# Altium footprint library PCB8.PcbLib: 32 footprints (part 1 of 2)
Each footprint in its own frame and in the unit in brackets; x right, y up, seen from the top. Pads: shape width x height; smd on the part's side, far side on the other; paste and mask are expansions set on the pad; w line width, h text height; cw(c..) or ccw(c..) is an arc to the next point about the centre after c.
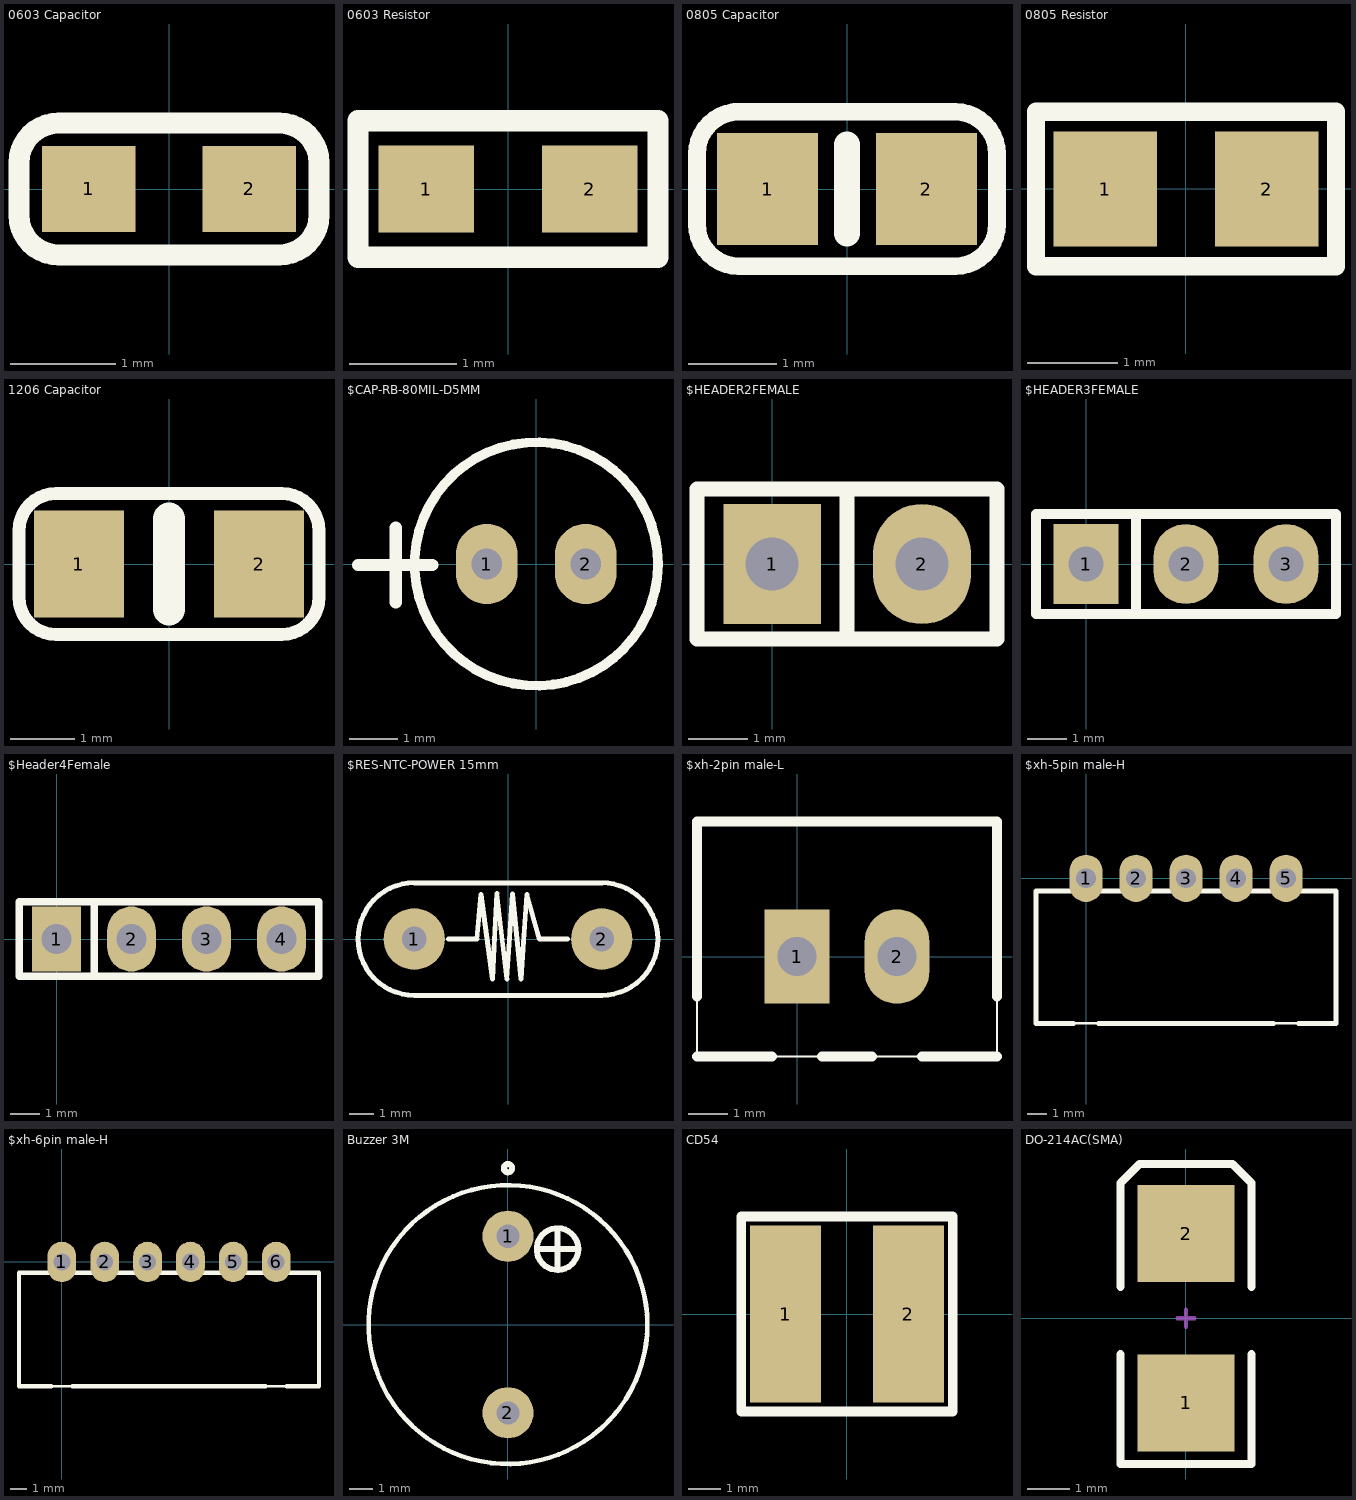
[diagram p0: the footprints below, top view; thin cyan lines are the x and y axes]

## 0603 Capacitor [mil]
height 192.91
pads (2):
  rect 35x32 smd: 1(-29.99,0.01) 2(30.01,0.01)
Top Overlay:
  lines w7.87: -56.1,-9.84 ccw(c-41.34,-9.84) -41.34,-24.61 41.34,-24.61 ccw(c41.34,-9.84) 56.1,-9.84 56.1,9.84 ccw(c41.34,9.84) 41.34,24.61 -41.34,24.61 ccw(c-41.34,9.84) -56.1,9.84 -56.1,-9.84
3D body "SW3dPS-0603 SMD Capacitor.STEP": height 11.89, standoff 0, extent -31.49,-15.74 31.5,15.75

## 0603 Resistor [mil]
height 192.91
pads (2):
  rect 35x32 smd: 1(-30,0) 2(30,0)
Top Overlay:
  lines w7.87: -55,-25 55,-25 55,25 -55,25 -55,-25
3D body "User Library-RESC1608X05N.STEP": height 17.76, standoff 0, extent -30.51,-16.73 30.52,16.73

## 0805 Capacitor [mm]
pads (2):
  rect 1.143x1.27 smd: 1(-0.9,0) 2(0.9,0)
Top Overlay:
  lines w0.2: -1.275,0.875 1.225,0.875 cw(c1.225,0.4) 1.7,0.4 1.7,-0.4 cw(c1.225,-0.4) 1.225,-0.875 -1.225,-0.875 cw(c-1.225,-0.4) -1.7,-0.4 -1.7,0.4 cw(c-1.225,0.4) -1.225,0.875
  lines w0.3: 0,-0.5 0,0.5
3D body "SW3dPS-0805 SMD Capacitor.STEP": height 0.78, standoff 0, extent -1,-0.625 1,0.625

## 0805 Resistor [mil]
pads (2):
  rect 45x50 smd: 1(-35,0) 2(35,0)
Top Overlay:
  lines w7.87: -65,-33.46 -65,33.46 65,33.46 65,-33.46 -65,-33.46
3D body "User Library-RESC2012X05N.STEP": height 17.76, standoff 0, extent -39.36,-24.6 39.38,24.61

## 1206 Capacitor [mil]
height 70.87
pads (2):
  rect 55x65 smd: 1(-55,0) 2(55,0)
Top Overlay:
  lines w7.87: -91.54,-20.4 ccw(c-68.9,-20.4) -68.9,-43.03 68.89,-43.03 ccw(c68.89,-20.39) 91.53,-20.39 91.53,20.4 ccw(c68.89,20.4) 68.89,43.04 -68.9,43.03 ccw(c-68.9,20.4) -91.54,20.4 -91.54,-20.4
  lines w19.68: 0,-27.56 0,27.56
3D body "SW3dPS-1206 SMD Capacitor.STEP": height 39.45, standoff 0, extent -62.99,-31.5 63,31.5

## $CAP-RB-80MIL-D5MM [mil]
height 192.91
pads (2):
  oval 50x65 hole 25: 1(-40,0) 2(40,0)
Top Overlay:
  circle w7.87: c0,0 r98.43
  lines w10: -144.08,-0.79 -84.08,-0.79 ; -113.69,-30.79 -113.69,29.21
3D body "SW3dPS-Cap electro 5x11x2mm.STEP": height 445.88, standoff -136.68, extent -99.43,-99.43 99.42,99.42

## $HEADER2FEMALE [mil]
height 192.91
pads (2):
  rect 65x80 hole 35.43: 1(0,0)
  oval 65x80 hole 35.43: 2(100,0)
Top Overlay:
  lines w10: 50,-50 50,50 ; -50,-50 150,-50 150,50 -50,50 -50,-50
3D body: height 350, standoff 0, extent -50,-50 150,50
3D body: height 300, standoff -100, extent -14.96,-14.93 14.92,15.01
3D body: height 300, standoff -100, extent 85.12,-14.96 115,14.98

## $HEADER3FEMALE [mil]
pads (3):
  rect 65x80 hole 35.43: 1(0,0)
  oval 65x80 hole 35.43: 2(100,0) 3(200,0)
Top Overlay:
  lines w10: 50,-50 50,50 ; -50,-50 250,-50 250,50 -50,50 -50,-50
3D body: height 350, standoff 0, extent -50,-50 250,50
3D body: height 300, standoff -100, extent -14.88,-14.96 15,14.98
3D body: height 300, standoff -100, extent 85.12,-14.96 115,14.98
3D body: height 300, standoff -100, extent 185.12,-14.96 215,14.98

## $Header4Female [mm]
pads (4):
  rect 1.65x2.2 hole 1: 1(0,0)
  oval 1.65x2.2 hole 1: 2(2.54,0) 3(5.08,0) 4(7.62,0)
Top Overlay:
  lines w0.254: 1.27,-1.27 1.27,1.27 ; -1.27,-1.27 8.89,-1.27 8.89,1.27 -1.27,1.27 -1.27,-1.27
3D body: height 8.89, standoff 0, extent -1.27,-1.27 8.89,1.27
3D body: height 7.62, standoff -2.54, extent -0.381,-0.381 0.381,0.381
3D body: height 7.62, standoff -2.54, extent 2.159,-0.381 2.921,0.381
3D body: height 7.62, standoff -2.54, extent 4.699,-0.381 5.461,0.381
3D body: height 7.62, standoff -2.54, extent 7.239,-0.381 8.001,0.381

## $RES-NTC-POWER 15mm [mm]
height 4.9
pads (2):
  round 2.5 hole 1: 1(-3.81,0) 2(3.81,0)
Top Overlay:
  lines w0.2: -3.81,-2.286 cw(c-3.81,0) -3.81,2.286 ; -2.413,0 -1.27,0 ; 1.27,0 2.413,0 ; 3.81,-2.286 ccw(c3.81,0) 3.81,2.286
  lines w0.203: -3.81,-2.286 3.81,-2.286 ; -3.81,2.286 3.81,2.286 ; -1.27,0 -1.092,1.803 -0.635,-1.626 -0.457,1.854 -0.051,-1.626 0.178,1.829 0.533,-1.626 0.762,1.803 1.27,0
3D body "SW3dPS-JVR10N331k_vertical-1.STEP": height 11.49, standoff -3.01, extent -5.498,-1.761 5.498,1.753

## $xh-2pin male-L [mm]
pads (2):
  rect 1.651x2.4 hole 1: 1(0,0)
  oval 1.651x2.4 hole 1: 2(2.54,0)
Top Overlay:
  lines w0.051: -2.54,-2.54 -2.54,-1.016 ; -0.635,-2.54 0.635,-2.54 ; 1.905,-2.54 3.175,-2.54 ; 5.08,-2.54 5.08,-1.016
  lines w0.254: -2.54,-2.54 -0.635,-2.54 ; -2.54,-1.016 -2.54,3.429 5.08,3.429 5.08,-1.016 ; 0.635,-2.54 1.905,-2.54 ; 3.175,-2.54 5.08,-2.54
3D body: height 7.5, standoff 0, extent -2.54,-2.54 5.08,3.429
3D body: height 2.54, standoff -2.29, extent 2.222,-0.299 2.819,0.299
3D body: height 2.54, standoff -2.29, extent -0.318,-0.299 0.279,0.299

## $xh-5pin male-H [mm]
pads (5):
  oval 1.7x2.4 hole 1: 1(0,0) 2(2.54,0) 3(5.08,0) 4(7.62,0) 5(10.16,0)
Top Overlay:
  lines w0.127: -0.635,-7.366 0.635,-7.366 ; 9.525,-7.366 10.795,-7.366
  lines w0.254: -0.635,-7.366 -2.54,-7.366 -2.54,-0.635 12.7,-0.635 12.7,-7.366 10.795,-7.366 ; 0.635,-7.366 9.525,-7.366
3D body: height 5.7, standoff 0.1, extent -2.438,-7.366 12.7,-0.254
3D body: height 2.54, standoff -2.29, extent -0.318,-0.3 0.279,0.299
3D body: height 2.54, standoff -2.29, extent 2.222,-0.3 2.819,0.299
3D body: height 2.54, standoff -2.29, extent 4.762,-0.3 5.359,0.299
3D body: height 2.54, standoff -2.29, extent 7.302,-0.3 7.899,0.299
3D body: height 2.54, standoff -2.29, extent 9.842,-0.3 10.439,0.299

## $xh-6pin male-H [mm]
pads (6):
  oval 1.7x2.4 hole 1: 1(0,0) 2(2.54,0) 3(5.08,0) 4(7.62,0) 5(10.16,0) 6(12.7,0)
Top Overlay:
  lines w0.127: -0.635,-7.366 0.635,-7.366 ; 12.065,-7.366 13.335,-7.366
  lines w0.254: -0.635,-7.366 -2.54,-7.366 -2.54,-0.635 15.24,-0.635 15.24,-7.366 13.335,-7.366 ; 0.635,-7.366 12.065,-7.366
3D body: height 5.7, standoff 0.1, extent -2.438,-7.366 15.24,-0.254
3D body: height 2.54, standoff -2.29, extent -0.318,-0.3 0.279,0.299
3D body: height 2.54, standoff -2.29, extent 2.222,-0.3 2.819,0.299
3D body: height 2.54, standoff -2.29, extent 4.762,-0.3 5.359,0.299
3D body: height 2.54, standoff -2.29, extent 7.302,-0.3 7.899,0.299
3D body: height 2.54, standoff -2.29, extent 9.842,-0.3 10.439,0.299
3D body: height 2.54, standoff -2.29, extent 12.382,-0.3 12.979,0.299

## Buzzer 3M [mm]
height 1.8
pads (2):
  round 2.2 hole 1: 1(0,3.8) 2(0,-3.8)
Top Overlay:
  circle w0.2: c0,0 r6
  circle w0.254: c2.13,3.25 r0.898
  circle w0.254: c0,6.731 r0.18
  lines w0.254: 1.241,3.25 1.686,3.25 2.575,3.25 3.019,3.25 ; 2.13,2.352 2.13,4.139
3D body "SW3dPS-WST-1203UX.STEP": height 9.65, standoff -4.5, extent -6,-6 6,9.454

## CD54 [mm]
height 1.8
pads (2):
  rect 2.2x5.5 smd: 1(-1.9,0) 2(1.9,0)
Top Overlay:
  lines w0.3: -3.275,-3.025 -3.275,3.025 3.275,3.025 3.275,-3.025 -3.275,-3.025
3D body "User Library-SDR0604.STEP": height 4.55, standoff 0, extent -2.729,-2.75 2.779,2.85

## DO-214AC(SMA) [mm]
height 4.9
pads (2):
  rect 2.3x2.3 smd: 1(0,-2.003) 2(0,2.003)
Top Overlay:
  lines w0.2: -1.55,-0.85 -1.55,-3.45 1.55,-3.45 1.55,-0.85 ; -1.55,0.75 -1.55,3.2 -1.1,3.65 1.1,3.65 1.55,3.2 1.55,0.75
Mechanical 1:
  lines w0.1: -0.2,0 0.2,0 ; 0,-0.2 0,0.2
3D body "User Library-DIOM5528X26.STEP": height 2.6, standoff 0.03, extent -1.4,-2.75 1.4,2.75